# Altium footprint library Single_ETU_b_rev1.PcbLib: 25 footprints (part 1 of 4)
Each footprint in its own frame and in the unit in brackets; x right, y up, seen from the top. Pads: shape width x height; smd on the part's side, far side on the other; paste and mask are expansions set on the pad; w line width, h text height; cw(c..) or ccw(c..) is an arc to the next point about the centre after c.
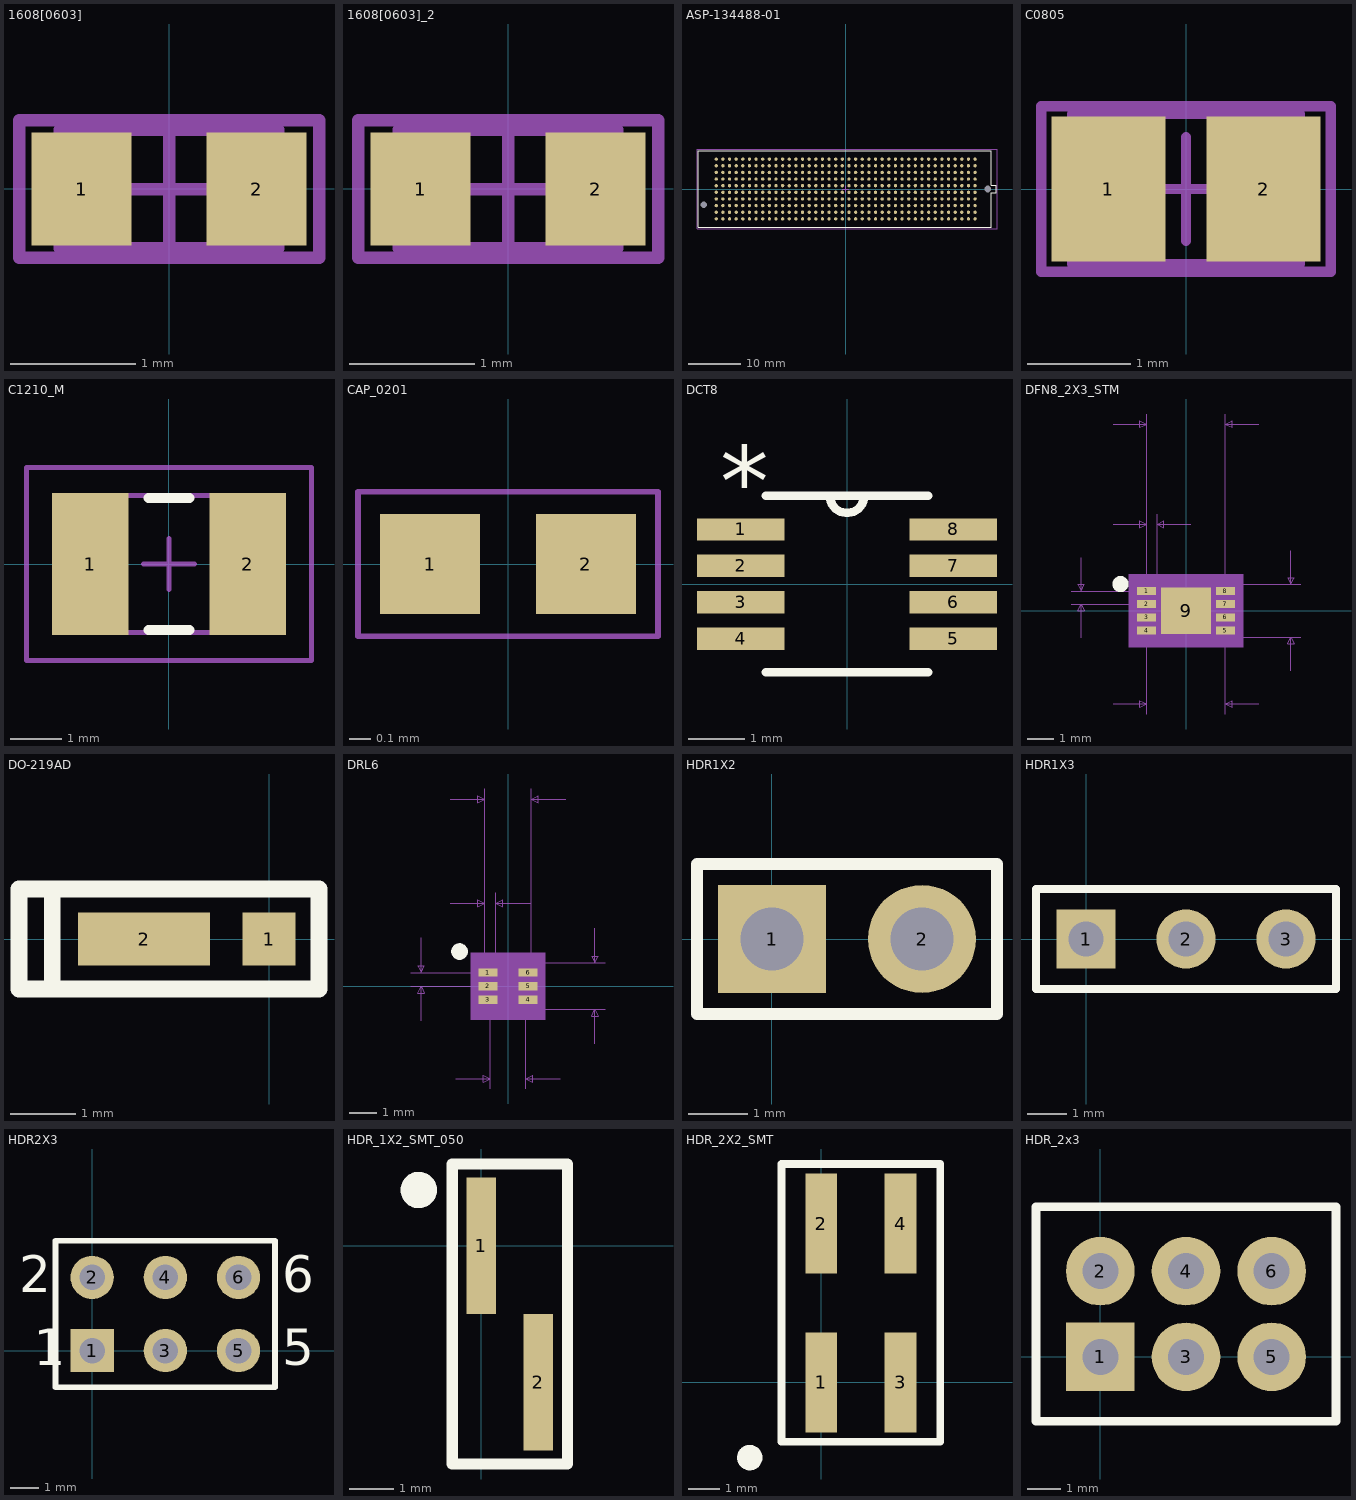
[diagram p0: the footprints below, top view; thin cyan lines are the x and y axes]

## 1608[0603] [mm]
height 2.79
pads (2):
  rect 0.8x0.9 smd: 1(-0.7,0) 2(0.7,0)
Mechanical 13:
  lines w0.1: -0.875,-0.475 -0.875,0.475 0.875,0.475 0.875,-0.475 -0.875,-0.475
Mechanical 15:
  lines w0.1: -0.475,0 0.475,0 ; 0,-0.475 0,0.475 ; -1.2,-0.55 -1.2,0.55 1.2,0.55 1.2,-0.55 -1.2,-0.55
3D body: height 1.3, standoff 0, extent -0.875,-0.475 0.875,0.475

## 1608[0603]_2 [mm]
pads (2):
  rect 0.8x0.9 smd: 1(-0.7,0) 2(0.7,0)
Mechanical 13:
  lines w0.1: -0.875,-0.475 -0.875,0.475 0.875,0.475 0.875,-0.475 -0.875,-0.475
Mechanical 15:
  lines w0.1: -0.475,0 0.475,0 ; 0,-0.475 0,0.475 ; -1.2,-0.55 -1.2,0.55 1.2,0.55 1.2,-0.55 -1.2,-0.55
3D body: height 1.3, standoff 0, extent -0.875,-0.475 0.875,0.475

## ASP-134488-01 [mil] "MC-HPC-10, 1.27mm PITCH TERMINAL ARRAY ASSEMBLY, MALE, VITA 57 CONNECTOR"
height 280
pads (402):
  round 25 smd paste+5 mask+2.01: A1(975,225) A2(925,225) A3(875,225) A4(825,225) A5(775,225) A6(725,225) A7(675,225) A8(625,225) A9(575,225) A10(525,225) A11(475,225) A12(425,225) A13(375,225) A14(325,225) A15(275,225) A16(225,225) A17(175,225) A18(125,225) A19(75,225) A20(25,225) A21(-25,225) A22(-75,225) A23(-125,225) A24(-175,225) A25(-225,225) A26(-275,225) A27(-325,225) A28(-375,225) A29(-425,225) A30(-475,225) A31(-525,225) A32(-575,225) A33(-625,225) A34(-675,225) A35(-725,225) A36(-775,225) A37(-825,225) A38(-875,225) A39(-925,225) A40(-975,225) B1(975,175) B2(925,175) B3(875,175) B4(825,175) B5(775,175) B6(725,175) B7(675,175) B8(625,175) B9(575,175) B10(525,175) B11(475,175) B12(425,175) B13(375,175) B14(325,175) B15(275,175) B16(225,175) B17(175,175) B18(125,175) B19(75,175) B20(25,175) B21(-25,175) B22(-75,175) B23(-125,175) B24(-175,175) B25(-225,175) B26(-275,175) B27(-325,175) B28(-375,175) B29(-425,175) B30(-475,175) B31(-525,175) B32(-575,175) B33(-625,175) B34(-675,175) B35(-725,175) B36(-775,175) B37(-825,175) B38(-875,175) B39(-925,175) B40(-975,175) E1(975,25) E2(925,25) E3(875,25) E4(825,25) E5(775,25) E6(725,25) E7(675,25) E8(625,25) E9(575,25) E10(525,25) E11(475,25) E12(425,25) E13(375,25) E14(325,25) E15(275,25) E16(225,25) E17(175,25) E18(125,25) E19(75,25) E20(25,25) E21(-25,25) E22(-75,25) E23(-125,25) E24(-175,25) E25(-225,25) E26(-275,25) E27(-325,25) E28(-375,25) E29(-425,25) E30(-475,25) E31(-525,25) E32(-575,25) E33(-625,25) E34(-675,25) E35(-725,25) E36(-775,25) E37(-825,25) E38(-875,25) E39(-925,25) E40(-975,25) F1(975,-25) F2(925,-25) F3(875,-25) F4(825,-25) F5(775,-25) F6(725,-25) F7(675,-25) F8(625,-25) F9(575,-25) F10(525,-25) F11(475,-25) F12(425,-25) F13(375,-25) F14(325,-25) F15(275,-25) F16(225,-25) F17(175,-25) F18(125,-25) F19(75,-25) F20(25,-25) F21(-25,-25) F22(-75,-25) F23(-125,-25) F24(-175,-25) F25(-225,-25) F26(-275,-25) F27(-325,-25) F28(-375,-25) F29(-425,-25) F30(-475,-25) F31(-525,-25) F32(-575,-25) F33(-625,-25) F34(-675,-25) F35(-725,-25) F36(-775,-25) F37(-825,-25) F38(-875,-25) F39(-925,-25) F40(-975,-25) J1(975,-175) J2(925,-175) J3(875,-175) J4(825,-175) J5(775,-175) J6(725,-175) J7(675,-175) J8(625,-175) J9(575,-175) J10(525,-175) J11(475,-175) J12(425,-175) J13(375,-175) J14(325,-175) J15(275,-175) J16(225,-175) J17(175,-175) J18(125,-175) J19(75,-175) J20(25,-175) J21(-25,-175) J22(-75,-175) J23(-125,-175) J24(-175,-175) J25(-225,-175) J26(-275,-175) J27(-325,-175) J28(-375,-175) J29(-425,-175) J30(-475,-175) J33(-625,-175) J34(-675,-175) J35(-725,-175) J36(-775,-175) J37(-825,-175) J38(-875,-175) J39(-925,-175) J40(-975,-175) K1(975,-225) K2(925,-225) K3(875,-225) K4(825,-225) K5(775,-225) K6(725,-225) K7(675,-225) K8(625,-225) K9(575,-225) K10(525,-225) K11(475,-225) K12(425,-225) K13(375,-225) K14(325,-225) K15(275,-225) K16(225,-225) K17(175,-225) K18(125,-225) K19(75,-225) K20(25,-225) K21(-25,-225) K22(-75,-225) K23(-125,-225) K24(-175,-225) K25(-225,-225) K26(-275,-225) K27(-325,-225) K28(-375,-225) K29(-425,-225) K30(-475,-225) K33(-625,-225) K34(-675,-225) K35(-725,-225) K36(-775,-225) K37(-825,-225) K38(-875,-225) K39(-925,-225) K40(-975,-225)
  round 25 smd paste+5 mask+2: C1(975,125) C2(925,125) C3(875,125) C4(825,125) C5(775,125) C6(725,125) C7(675,125) C8(625,125) C9(575,125) C10(525,125) C11(475,125) C12(425,125) C13(375,125) C14(325,125) C15(275,125) C16(225,125) C17(175,125) C18(125,125) C19(75,125) C20(25,125) C21(-25,125) C22(-75,125) C23(-125,125) C24(-175,125) C25(-225,125) C26(-275,125) C27(-325,125) C28(-375,125) C29(-425,125) C30(-475,125) C31(-525,125) C32(-575,125) C33(-625,125) C34(-675,125) C35(-725,125) C36(-775,125) C37(-825,125) C38(-875,125) C39(-925,125) C40(-975,125) D1(975,75) D2(925,75) D3(875,75) D4(825,75) D5(775,75) D6(725,75) D7(675,75) D8(625,75) D9(575,75) D10(525,75) D11(475,75) D12(425,75) D13(375,75) D14(325,75) D15(275,75) D16(225,75) D17(175,75) D18(125,75) D19(75,75) D20(25,75) D21(-25,75) D22(-75,75) D23(-125,75) D24(-175,75) D25(-225,75) D26(-275,75) D27(-325,75) D28(-375,75) D29(-425,75) D30(-475,75) D31(-525,75) D32(-575,75) D33(-625,75) D34(-675,75) D35(-725,75) D36(-775,75) D37(-825,75) D38(-875,75) D39(-925,75) D40(-975,75) G1(975,-75) G2(925,-75) G3(875,-75) G4(825,-75) G5(775,-75) G6(725,-75) G7(675,-75) G8(625,-75) G9(575,-75) G10(525,-75) G11(475,-75) G12(425,-75) G13(375,-75) G14(325,-75) G15(275,-75) G16(225,-75) G17(175,-75) G18(125,-75) G19(75,-75) G20(25,-75) G21(-25,-75) G22(-75,-75) G23(-125,-75) G24(-175,-75) G25(-225,-75) G26(-275,-75) G27(-325,-75) G28(-375,-75) G29(-425,-75) G30(-475,-75) G31(-525,-75) G32(-575,-75) G33(-625,-75) G34(-675,-75) G35(-725,-75) G36(-775,-75) G37(-825,-75) G38(-875,-75) G39(-925,-75) G40(-975,-75) H1(975,-125) H2(925,-125) H3(875,-125) H4(825,-125) H5(775,-125) H6(725,-125) H7(675,-125) H8(625,-125) H9(575,-125) H10(525,-125) H11(475,-125) H12(425,-125) H13(375,-125) H14(325,-125) H15(275,-125) H16(225,-125) H17(175,-125) H18(125,-125) H19(75,-125) H20(25,-125) H21(-25,-125) H22(-75,-125) H23(-125,-125) H24(-175,-125) H25(-225,-125) H26(-275,-125) H27(-325,-125) H28(-375,-125) H29(-425,-125) H30(-475,-125) H31(-525,-125) H32(-575,-125) H33(-625,-125) H34(-675,-125) H35(-725,-125) H36(-775,-125) H37(-825,-125) H38(-875,-125) H39(-925,-125) H40(-975,-125)
  oval 23x25 smd paste+5 mask+2.01: J31(-525,-175) J32(-575,-175) K31(-525,-225) K32(-575,-225)
  round 2 hole 50 unplated: MH1(1070.5,0) MH2(-1070.5,-120)
Top Overlay:
  lines w7.87: -1110,-289 1098,-289 1098,-30 1133,-30 1133,30 1098,30 1098,289 -1110,289 -1110,-289
Mechanical 15:
  lines w3.94: -25,0 25,0 ; 0,-25 0,25 ; 1140,-35 1140,300 -1120,300 -1120,-300 1120,-300 1140,-300 1140,-20
3D body "SEAM-40-03.5-S-10-2-A-K-TR.stp": height 281.07, standoff -48.93, extent -1098,-289 1133,289

## C0805 [mm] "Chip Capacitor, Body 2.0x1.3mm, IPC High Density"
height 1.4
pads (2):
  rect 1.1x1.4 smd: 1(-0.75,0) 2(0.75,0)
Mechanical 13:
  lines w0.1: -1.1,-0.725 1.1,-0.725 1.1,0.725 -1.1,0.725 -1.1,-0.725
Mechanical 15:
  lines w0.1: -0.5,0 0.5,0 ; 0,-0.5 0,0.5 ; -1.4,-0.8 1.4,-0.8 1.4,0.8 -1.4,0.8 -1.4,-0.8
3D body: height 1.4, standoff 0, extent -1.1,-0.725 1.1,0.725

## C1210_M [mm] "Chip Capacitor, Body 3.2x2.5mm, IPC Low Density"
height 1.5
pads (2):
  rect 1.5x2.8 smd: 1(-1.55,0) 2(1.55,0)
Top Overlay:
  lines w0.2: -0.4,-1.3 0.4,-1.3 ; -0.4,1.3 0.4,1.3
Mechanical 13:
  lines w0.1: -1.7,-1.35 1.7,-1.35 1.7,1.35 -1.7,1.35 -1.7,-1.35
Mechanical 15:
  lines w0.1: -0.5,0 0.5,0 ; 0,-0.5 0,0.5 ; -2.8,-1.9 2.8,-1.9 2.8,1.9 -2.8,1.9 -2.8,-1.9
3D body: height 1.5, standoff 0, extent -1.7,-1.35 1.7,1.35

## CAP_0201 [mil]
height 109.84
pads (2):
  rect 18x18 smd: 1(-14,0) 2(14,0)
Mechanical 15:
  lines w1: -27,-13 -27,13 27,13 27,-13 -27,-13

## DCT8 [mil]
height 109.84
pads (8):
  rect 61.5x15.7 smd: 1(-74.8,38.4) 2(-74.8,12.8) 3(-74.8,-12.8) 4(-74.8,-38.4) 5(74.8,-38.4) 6(74.8,-12.8) 7(74.8,12.8) 8(74.8,38.4)
Top Overlay:
  lines w6: -57,-62 57,-62 ; -57,62 57,62 ; -12,62 ccw(c0,62) 12,62
  text "*" at -89.25,47.39 h50
3D body: height 10, standoff 0, extent 0,0 10,10

## DFN8_2X3_STM [mil]
height 109.84
pads (9):
  rect 28x12 smd paste+0 mask+0: 1(-59,29.53) 2(-59,9.84) 3(-59,-9.84) 4(-59,-29.53) 5(59,-29.53) 6(59,-9.84) 7(59,9.84) 8(59,29.53)
  rect 75x69 smd paste-2 mask+0: 9(0,0)
Top Overlay:
  circle w12: c-98,40 r6
Mechanical 5:
  region: 86,-54.5 -86,-54.5 -86,54.5 86,54.5
Mechanical 7:
  lines w1: -172,9.84 -57,9.84 ; -172,29.53 -57,29.53 ; -157,-40.16 -157,9.84 ; -157,79.53 -157,29.53 ; -109,-139.5 -59,-139.5 ; -109,129.53 -59,129.53 ; -109,279.53 -59,279.53 ; -59,-154.5 -59,-39.5 ; -59,144.53 -59,29.53 -59,294.53 ; -43,29.53 -43,144.53 ; 7,129.53 -43,129.53 ; 59,-154.5 59,-39.5 172,-39.5 ; 59,29.53 59,294.53 ; 59,39.5 172,39.5 ; 109,-139.5 59,-139.5 ; 109,279.53 59,279.53 ; 157,-89.5 157,-39.5 ; 157,89.5 157,39.5 ; -157,9.84 -162,-0.16 -152,-0.16 -157,9.84 ; -157,29.53 -162,39.53 -152,39.53 -157,29.53 ; -59,-139.5 -69,-134.5 -69,-144.5 -59,-139.5 ; -59,129.53 -69,134.53 -69,124.53 -59,129.53 ; -59,279.53 -69,284.53 -69,274.53 -59,279.53 ; -43,129.53 -33,134.53 -33,124.53 -43,129.53 ; 59,-139.5 69,-134.5 69,-144.5 59,-139.5 ; 59,279.53 69,284.53 69,274.53 59,279.53 ; 157,-39.5 152,-49.5 162,-49.5 157,-39.5 ; 157,39.5 152,49.5 162,49.5 157,39.5
  text "Default Padstyle: RX28Y10D0T" at -350,-409.5 h50
  text "Heat Tab Padstyle: RX75Y69D0T" at -362.5,-469.5 h50
  text "Alt 1 Padstyle: OX60Y90D30P" at -337.5,-589.5 h50
  text "Alt 2 Padstyle: OX90Y60D30P" at -337.5,-649.5 h50
  text "0.118in/2.997mm" at -93.75,299.53 h25
  text "0.016in/0.406mm" at -144.75,149.53 h25
  text "0.02in/0.5mm" at -327,7.18 h25
  text "0.079in/2.007mm" at 177,-12.5 h25
  text "0.118in/2.997mm" at -93.75,-184.5 h25
Mechanical 13:
  circle w0: c-43,29.53 r3
  lines w0: -12,39.5 ccw(c0,39.5) 12,39.5
  lines w1: -59,-39.5 59,-39.5 59,39.5 -59,39.5 -59,-39.5
Mechanical 15:
  region: -69,-44.53 -81,-44.53 -81,44.53 -69,44.53 -69,49.5 69,49.5 69,44.53 81,44.53 81,-44.53 69,-44.53 69,-49.5 -69,-49.5
  lines w6: -81,-44.53 -81,44.53 -69,44.53 -69,49.5 69,49.5 69,44.53 81,44.53 81,-44.53 69,-44.53 69,-49.5 -69,-49.5 -69,-44.53 -81,-44.53
3D body: height 10, standoff 0, extent 0,0 10,10

## DO-219AD [mil] "DO-219AD aka MicroSMP"
height 0.73
pads (2):
  rect 32x32 smd: 1(0,0)
  rect 79x32 smd: 2(-75,0)
Top Overlay:
  lines w10: -130,-30 -130,30 ; -150,-30 30,-30 30,30 -150,30 -150,-30

## DRL6 [mil]
pads (6):
  rect 27x12 smd: 1(-29,19.68) 2(-29,0) 3(-29,-19.69) 4(29,-19.69) 5(29,0) 6(29,19.68)
Top Overlay:
  circle w12: c-70,50 r6
Mechanical 5:
  region: 53.46,-48.46 -53.46,-48.46 -53.46,48.46 53.46,48.46
Mechanical 7:
  lines w1: -140.59,0 -25.59,0 ; -140.59,19.68 -25.59,19.68 ; -125.59,-50 -125.59,0 ; -125.59,69.68 -125.59,19.68 ; -83.47,119.68 -33.47,119.68 ; -83.47,269.68 -33.47,269.68 ; -75.59,-133.46 -25.59,-133.46 ; -33.47,134.68 -33.47,19.68 -33.47,284.68 ; -25.59,-148.46 -25.59,-33.46 ; -17.72,19.68 -17.72,134.68 ; 25.59,-148.46 25.59,-33.46 140.59,-33.46 ; 25.59,33.46 140.59,33.46 ; 32.28,119.68 -17.72,119.68 ; 33.46,19.68 33.46,284.68 ; 75.59,-133.46 25.59,-133.46 ; 83.46,269.68 33.46,269.68 ; 125.59,-83.46 125.59,-33.46 ; 125.59,83.46 125.59,33.46 ; -125.59,0 -130.59,-10 -120.59,-10 -125.59,0 ; -125.59,19.68 -130.59,29.68 -120.59,29.68 -125.59,19.68 ; -33.47,119.68 -43.47,124.68 -43.47,114.68 -33.47,119.68 ; -33.47,269.68 -43.47,274.68 -43.47,264.68 -33.47,269.68 ; -25.59,-133.46 -35.59,-128.46 -35.59,-138.46 -25.59,-133.46 ; -17.72,119.68 -7.72,124.68 -7.72,114.68 -17.72,119.68 ; 25.59,-133.46 35.59,-128.46 35.59,-138.46 25.59,-133.46 ; 33.46,269.68 43.46,274.68 43.46,264.68 33.46,269.68 ; 125.59,-33.46 120.59,-43.46 130.59,-43.46 125.59,-33.46 ; 125.59,33.46 120.59,43.46 130.59,43.46 125.59,33.46
  text "Default Padstyle: RX25p75Y11p84D0T" at -425,-403.46 h50
  text "Alt 1 Padstyle: OX60Y90D30P" at -337.5,-523.46 h50
  text "Alt 2 Padstyle: OX90Y60D30P" at -337.5,-583.46 h50
  text "6.692914E-02in/1.7mm" at -125,289.69 h25
  text "1.574803E-02in/0.4mm" at -150.59,139.69 h25
  text "1.968504E-02in/0.5mm" at -65,10 h25
  text "6.692914E-02in/1.7mm" at 145.59,-12.5 h25
  text "0.0511811in/1.3mm" at -106.25,-178.46 h25
Mechanical 13:
  lines w1: -25.59,-33.46 25.59,-33.46 25.59,33.46 -25.59,33.46 -25.59,-33.46
Mechanical 15:
  region: 48.46,-43.46 -48.46,-43.46 -48.46,43.46 48.46,43.46
  lines w6: -48.47,-43.46 -48.47,43.46 48.46,43.46 48.46,-43.46 -48.47,-43.46
3D body: height 10, standoff 0, extent 0,0 10,10

## HDR1X2 [mil] "Connector; Header; 2 Position"
height 109.84
pads (2):
  rect 72x72 / inner round 72 / far side rect 72x72 hole 42: 1(0,0)
  round 72 hole 42: 2(100,0)
Top Overlay:
  lines w7.87: -50,-50 -50,50 150,50 150,-50 -50,-50

## HDR1X3 [mm] "Connector; Header; 3 Position"
height 2.79
pads (3):
  rect 1.5x1.5 hole 0.9: 1(0,0)
  round 1.5 hole 0.9: 2(2.54,0) 3(5.08,0)
Top Overlay:
  lines w0.2: -1.27,-1.27 -1.27,1.27 6.35,1.27 6.35,-1.27 -1.27,-1.27

## HDR2X3 [mm] "Connector; Header; 3x2 Position"
pads (6):
  rect 1.5x1.5 / inner round 1.5 / far side rect 1.5x1.5 hole 0.889: 1(0,0)
  round 1.5 hole 0.889: 2(0,2.54) 3(2.54,0) 4(2.54,2.54) 5(5.08,0) 6(5.08,2.54)
Top Overlay:
  lines w0.2: 1.482,-1.27 6.35,-1.27 ; 6.35,-1.27 6.35,3.81 -1.27,3.81 -1.27,-1.27 6.35,-1.27
  text "6" at 6.604,2.032 h1.27
  text "5" at 6.604,-0.508 h1.27
  text "2" at -2.54,2.032 h1.27
  text "1" at -2.032,-0.508 h1.27

## HDR_1X2_SMT_050 [mil]
pads (2):
  rect 26x120 smd: 1(0,0) 2(50,-120)
Top Overlay:
  circle w16: c-55,49 r8
  lines w10: -25.59,-191.93 -25.59,71.85 75.79,71.85 75.79,-191.93 -25.59,-191.93

## HDR_2X2_SMT [mil]
pads (4):
  rect 40x126 smd: 1(0,0) 2(0,200) 3(100,0) 4(100,200)
Top Overlay:
  circle w16: c-90,-95 r8
  lines w10: -50,-75 -50,275 150,275 150,-75 -50,-75

## HDR_2x3 [mil]
height 109.84
pads (6):
  rect 80x80 / inner round 80 / far side rect 80x80 hole 42: 1(0,0)
  round 80 hole 42: 2(0,100) 3(100,0) 4(100,100) 5(200,0) 6(200,100)
Top Overlay:
  lines w10: -75,-75 275,-75 275,175 -75,175 -75,-75